# Altium footprint library huan_basic.PcbLib: 138 footprints (part 1 of 9)
Each footprint in its own frame and in the unit in brackets; x right, y up, seen from the top. Pads: shape width x height; smd on the part's side, far side on the other; paste and mask are expansions set on the pad; w line width, h text height; cw(c..) or ccw(c..) is an arc to the next point about the centre after c.
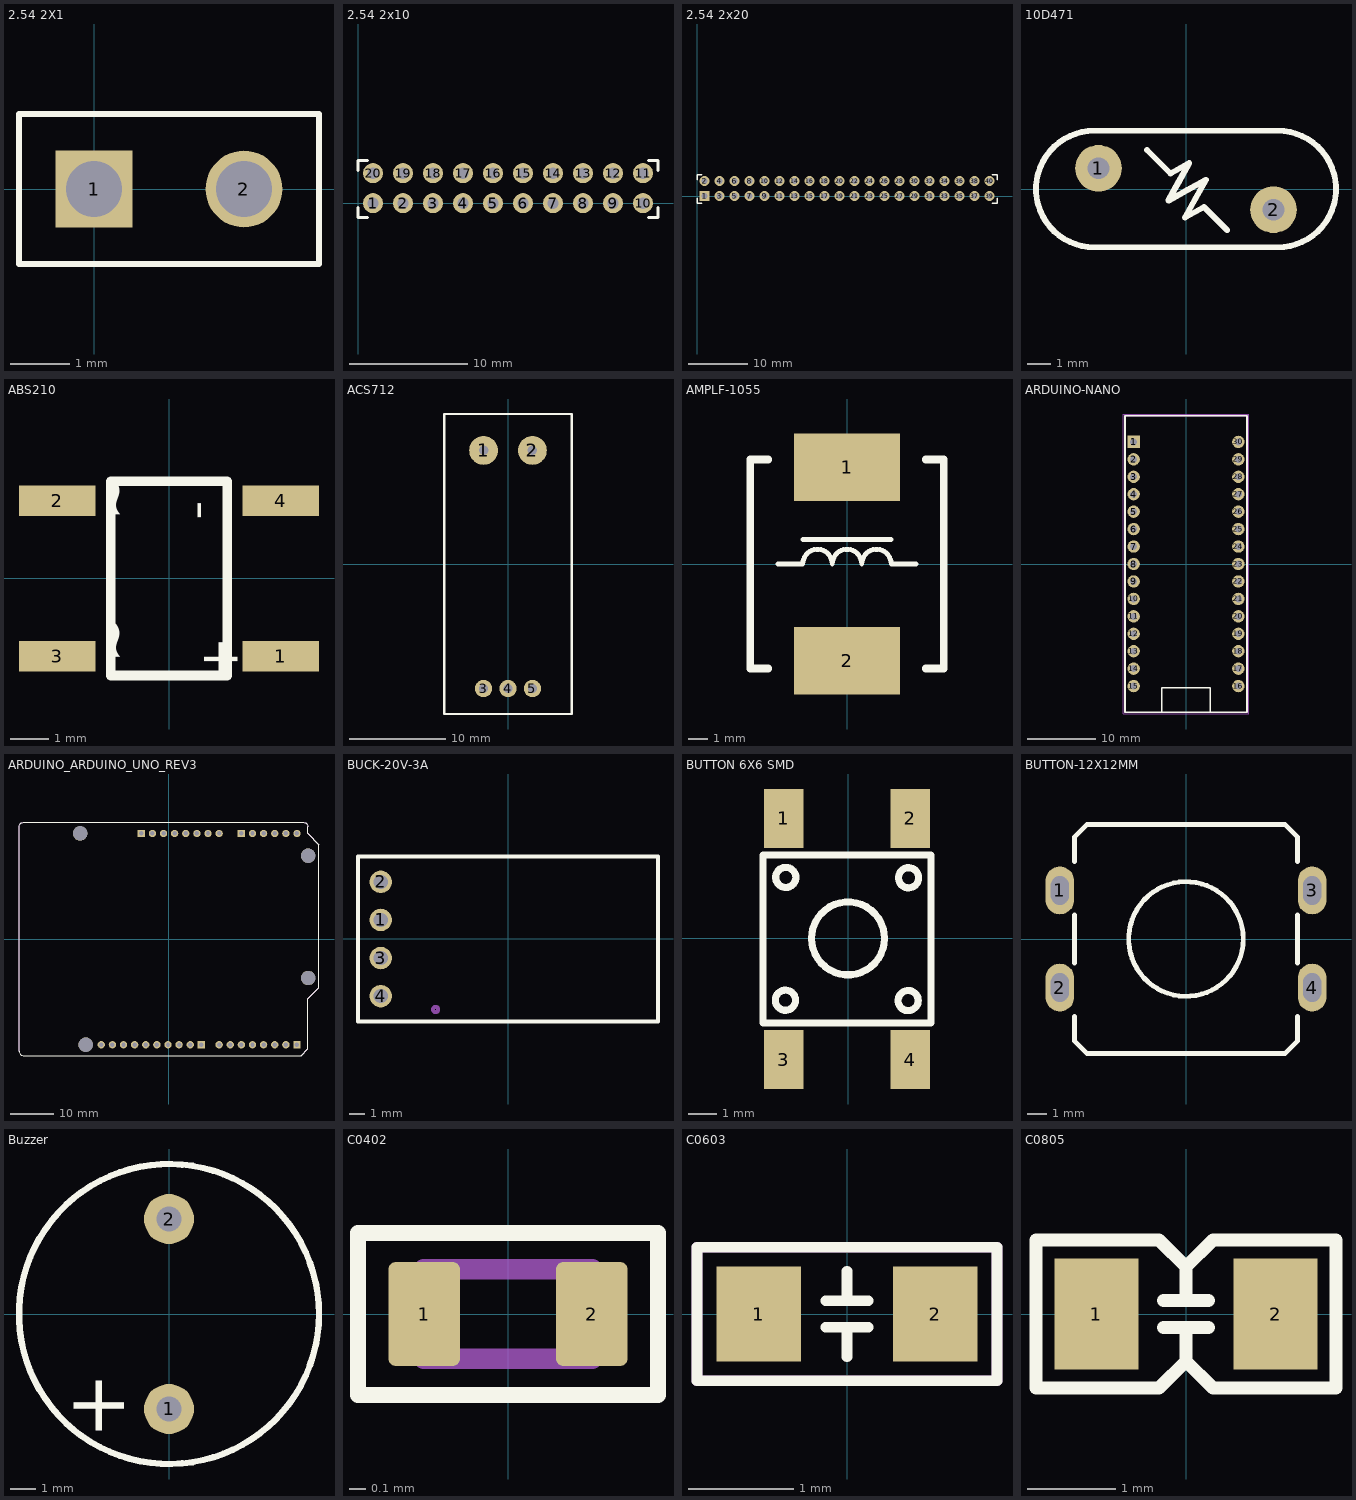
[diagram p0: the footprints below, top view; thin cyan lines are the x and y axes]

## 2.54 2X1 [mm]
pads (2):
  rect 1.3x1.3 hole 0.94: 1(0,0)
  round 1.3 hole 0.94: 2(2.54,0)
Top Overlay:
  lines w0.1: -1.27,-1.27 -1.27,1.27 3.81,1.27 3.81,-1.27 -1.27,-1.27
3D body "Jumper-red.step": height 8.5, standoff 2.5, extent -1.33,-1.2 3.87,1.2
3D body "100mill Male Pin Header_2P_R.STEP": height 8.4, standoff -2.8, extent -1.27,-1.23 3.81,1.27

## 2.54 2x10 [mm]
pads (20):
  round 1.7 hole 0.97: 1(1.27,0) 2(3.81,0) 3(6.35,0) 4(8.89,0) 5(11.43,0) 6(13.97,0) 7(16.51,0) 8(19.05,0) 9(21.59,0) 10(24.13,0) 11(24.13,2.54) 12(21.59,2.54) 13(19.05,2.54) 14(16.51,2.54) 15(13.97,2.54) 16(11.43,2.54) 17(8.89,2.54) 18(6.35,2.54) 19(3.81,2.54) 20(1.27,2.54)
Top Overlay:
  lines w0.254: 0,-0.381 0,-1.2 0.819,-1.2 ; 0,2.781 0,3.6 0.819,3.6 ; 24.581,-1.2 25.4,-1.2 25.4,-0.381 ; 24.581,3.6 25.4,3.6 25.4,2.781
3D body "10x_Male_Pin_2.54_mm.STEP": height 8.56, standoff -2.54, extent 0,-1.2 25.4,1.2
3D body "10x_Male_Pin_2.54_mm.STEP": height 8.56, standoff -2.54, extent 0,1.2 25.4,3.6

## 2.54 2x20 [mm]
pads (40):
  rect 1.7x1.7 hole 0.97: 1(1.27,0)
  round 1.7 hole 0.97: 2(1.27,2.54) 3(3.81,0) 4(3.81,2.54) 5(6.35,0) 6(6.35,2.54) 7(8.89,0) 8(8.89,2.54) 9(11.43,0) 10(11.43,2.54) 11(13.97,0) 12(13.97,2.54) 13(16.51,0) 14(16.51,2.54) 15(19.05,0) 16(19.05,2.54) 17(21.59,0) 18(21.59,2.54) 19(24.13,0) 20(24.13,2.54) 21(26.67,0) 22(26.67,2.54) 23(29.21,0) 24(29.21,2.54) 25(31.75,0) 26(31.75,2.54) 27(34.29,0) 28(34.29,2.54) 29(36.83,0) 30(36.83,2.54) 31(39.37,0) 32(39.37,2.54) 33(41.91,0) 34(41.91,2.54) 35(44.45,0) 36(44.45,2.54) 37(46.99,0) 38(46.99,2.54) 39(49.53,0) 40(49.53,2.54)
Top Overlay:
  lines w0.254: 0,-0.381 0,-1.2 0.819,-1.2 ; 0,2.781 0,3.6 0.819,3.6 ; 49.981,-1.2 50.8,-1.2 50.8,-0.381 ; 49.981,3.6 50.8,3.6 50.8,2.781
3D body "10x_Male_Pin_2.54_mm.STEP": height 8.56, standoff -2.54, extent 25.4,-1.2 50.8,1.2
3D body "10x_Male_Pin_2.54_mm.STEP": height 8.56, standoff -2.54, extent 25.4,1.2 50.8,3.6
3D body "10x_Male_Pin_2.54_mm.STEP": height 8.56, standoff -2.54, extent 0,-1.2 25.4,1.2
3D body "10x_Male_Pin_2.54_mm.STEP": height 8.56, standoff -2.54, extent 0,1.2 25.4,3.6

## 10D471 [mm]
pads (2):
  round 2 hole 0.94: 1(-3.755,0.889) 2(3.755,-0.889)
Top Overlay:
  lines w0.254: 1.771,-1.771 0.769,-0.769 -0.039,-1.218 0.41,-0.41 0.859,0.399 0.05,-0.05 -0.758,-0.499 -0.309,0.309 0.14,1.117 -0.668,0.668 ; -0.668,0.668 -1.671,1.671 -0.668,0.668 ; -3.937,-2.5 cw(c-3.937,0) -3.937,2.5 3.937,2.5 cw(c3.937,0) 3.937,-2.5 -3.937,-2.5
3D body "B72210a1.8th5.stp": height 14.6, standoff -2.5, extent -6,-2.5 6,2.5

## ABS210 [mm]
pads (4):
  rect 2x0.8 smd: 1(2.921,-2.032) 2(-2.921,2.032) 3(-2.921,-2.032) 4(2.921,2.032)
Top Overlay:
  lines w0.254: -1.524,-2.54 1.524,-2.54 1.524,2.54 -1.524,2.54 -1.524,-2.54
  text "+" at 0.58,-1.524 h1.75
  text "-" at 0.097,2.032 h1.75
  text "~" at -0.604,-2.205 h1.75
  text "~" at -0.604,1.519 h1.75
3D body "ABS210TR--3DModel-STEP-510211.STEP": height 1.7, standoff 0, extent -3.2,-2.525 3.2,2.525

## ACS712 [mm]
pads (5):
  round 3 hole 1: 1(-2.54,11.811) 2(2.54,11.811)
  round 1.8 hole 0.94: 3(-2.54,-12.954) 4(0,-12.954) 5(2.54,-12.954)
Top Overlay:
  lines w0.254: -6.65,-15.6 -6.65,15.6 6.65,15.6 6.65,-15.6 -6.65,-15.6
3D body "acs712.STEP": height 13.51, standoff -1.4, extent -6.65,-15.6 6.65,15.6

## AMPLF-1055 [mm]
pads (2):
  rect 5.5x3.5 smd: 1(0,5) 2(0,-5)
Top Overlay:
  lines w0.254: -3.556,0 -2.286,0 cw(c-1.524,0) -0.762,0 cw(c0,0) 0.762,0 cw(c1.524,0) 2.286,0 3.556,0 ; -2.286,1.27 2.286,1.27
  lines w0.4: -4.064,-5.4 -5,-5.4 -5,5.4 -4.064,5.4 ; 4.064,-5.4 5,-5.4 5,5.4 4.064,5.4
3D body "Inductor_SMD_AMPLF_1055.STEP": height 5.31, standoff -0.2, extent -5,-5.4 5,5.4

## ARDUINO-NANO [mm]
pads (30):
  rect 1.8x1.8 hole 1: 1(-7.62,17.78)
  round 1.8 hole 1: 2(-7.62,15.24) 3(-7.62,12.7) 4(-7.62,10.16) 5(-7.62,7.62) 6(-7.62,5.08) 7(-7.62,2.54) 8(-7.62,0) 9(-7.62,-2.54) 10(-7.62,-5.08) 11(-7.62,-7.62) 12(-7.62,-10.16) 13(-7.62,-12.7) 14(-7.62,-15.24) 15(-7.62,-17.78) 16(7.62,-17.78) 17(7.62,-15.24) 18(7.62,-12.7) 19(7.62,-10.16) 20(7.62,-7.62) 21(7.62,-5.08) 22(7.62,-2.54) 23(7.62,0) 24(7.62,2.54) 25(7.62,5.08) 26(7.62,7.62) 27(7.62,10.16) 28(7.62,12.7) 29(7.62,15.24) 30(7.62,17.78)
Top Overlay:
  lines w0.254: -3.513,-21.59 -3.513,-18.034 0,-18.034 3.513,-18.034 3.513,-21.59 ; -8.89,-21.59 8.89,-21.59 8.89,21.59 -8.89,21.59 -8.89,-21.59
Mechanical 1:
  lines w0.127: -8.89,-21.59 -8.89,21.59 8.89,21.59 8.89,-21.59 -8.89,-21.59
Mechanical 15:
  lines w0.05: -9.14,-21.84 9.14,-21.84 9.14,21.84 -9.14,21.84 -9.14,-21.84
3D body "Arduino_NANO_CH340.step": height 9, standoff -5.14, extent -8.89,-22.48 8.89,21.71

## ARDUINO_ARDUINO_UNO_REV3 [mil]
pads (36):
  round 66 hole 40: 3V3(50.9,949.18) 5V(150.9,949.18) A1(750.9,949.18) A2(850.9,949.18) A3(950.9,949.18) A4(1050.9,949.18) A4_SDA(-509.11,-950.82) A5(1150.9,949.18) A5_SCL(-609.11,-950.82) AREF(-409.11,-950.82) D1(1050.89,-950.82) D2(950.89,-950.82) D3(850.89,-950.82) D4(750.89,-950.82) D5(650.89,-950.82) D6(550.89,-950.82) D7(450.89,-950.82) D9(190.89,-950.82) D10(90.89,-950.82) D11(-9.11,-950.82) D12(-109.11,-950.82) D13(-209.11,-950.82) GND_1(350.9,949.18) GND_2(250.9,949.18) GND_3(-309.11,-950.82) IOREF(-149.1,949.18) RST(-49.1,949.18) VIN(450.9,949.18)
  rect 66x66 hole 40: A0(650.9,949.18) D0(1150.89,-950.82) D8(290.89,-950.82) P1(-249.1,949.18)
  round 129.92 hole 129.92 unplated: ""(-799.1,949.18) ""(-749.11,-950.82) ""(1250.89,-350.82) ""(1250.9,749.18)
Top Overlay:
  lines w5: -1349.11,-1009.2 -1349.11,1010.09 -1347.44,1020.08 -1344.1,1029.24 -1337.44,1037.58 -1329.11,1044.24 -1319.95,1047.57 -1309.95,1049.24 1209.99,1049.24 1219.99,1047.57 1229.15,1044.24 1237.48,1037.58 1244.15,1029.24 1247.48,1020.08 1249.14,1010.08 1249.14,949.27 1349.11,849.31 1349.11,-439.4 1249.14,-539.37 1249.14,-989.21 1189.16,-1049.19 -1309.95,-1049.18 -1319.95,-1047.52 -1329.11,-1043.35 -1337.44,-1037.52 -1344.11,-1029.19 -1347.44,-1020.03 -1349.11,-1009.2
Mechanical 13:
  lines w5: -1349.11,-1010.09 -1349.11,1009.2 -1347.44,1020.03 -1344.11,1029.19 -1337.44,1037.52 -1329.11,1043.35 -1319.95,1047.52 -1309.95,1049.18 1189.16,1049.18 ; -1349.1,1010.08 -1347.44,1020.08 -1344.1,1029.24 -1337.44,1037.58 -1329.11,1044.24 -1319.95,1047.57 -1309.95,1049.24 1209.99,1049.24 1219.99,1047.57 1229.15,1044.24 1237.48,1037.58 1244.15,1029.24 1247.48,1020.08 1249.14,1010.08 1249.14,949.27 1349.11,849.31 1349.11,-439.4 1249.14,-539.37 1249.14,-989.21 1189.16,-1049.19
3D body "A000066.STEP": height -5.11, standoff -590.16, extent -1605.52,-1050 1350,1050

## BUCK-20V-3A [mm]
pads (4):
  round 1.5 hole 0.94: 1(-8.484,1.27) 2(-8.484,3.81) 3(-8.484,-1.27) 4(-8.484,-3.81)
Top Overlay:
  lines w0.254: -10,-5.5 -10,5.5 10,5.5 10,-5.5 -10,-5.5
Mechanical 15:
  circle w0.254: c-4.826,-4.699 r0.18
3D body "Buck Converter Model.STEP": height 6.6, standoff -5.8, extent -10,-5.5 10,5.5

## BUTTON 6X6 SMD [mm]
pads (4):
  rect 1.4x2.1 smd: 1(-2.286,4.274) 2(2.214,4.274) 3(-2.286,-4.318) 4(2.214,-4.318)
Top Overlay:
  circle w0.254: c2.145,-2.217 r0.359
  circle w0.254: c-2.231,-2.203 r0.359
  circle w0.254: c-2.217,2.173 r0.359
  circle w0.254: c2.159,2.159 r0.359
  circle w0.254: c0,0 r1.3
  lines w0.254: -3.036,-3.022 2.964,-3.022 2.964,2.978 -3.036,2.978 -3.036,-3.022
3D body "button_smd_6x6x5.0.stp": height 5, standoff 0, extent -3,-4 3,4

## BUTTON-12X12MM [mm]
pads (4):
  oval 1.5x2.5 hole 0.94 slot 1.5 at 90 deg: 1(-6.604,2.54) 2(-6.604,-2.54) 3(6.604,2.54) 4(6.604,-2.54)
Top Overlay:
  circle w0.254: c0,0 r3
  lines w0.254: -5.842,-4.064 -5.842,-5.334 -5.176,-6 0,-6 5.176,-6 5.842,-5.334 5.842,-4.064 ; -5.842,-1.27 -5.842,1.27 ; -5.842,4.064 -5.842,5.334 -5.176,6 0,6 5.176,6 5.842,5.334 5.842,4.064 ; 5.842,-1.27 5.842,1.27
3D body "12mm switch.step": height 8, standoff -2.8, extent -6.974,-6 6.974,6

## Buzzer [mm]
pads (2):
  round 2 hole 1: 1(0,-3.8) 2(0,3.8)
Top Overlay:
  circle w0.254: c0,0 r6
  text "+" at -1.034,-5.004 h4
3D body "buzzer.stp": height 9.5, standoff -5.5, extent -6,-6 6,6

## C0402 [mm]
pads (2):
  rrect20% 0.45x0.65 smd: 1(-0.525,0) 2(0.525,0)
Top Overlay:
  lines w0.1: -0.94,-0.508 0.94,-0.508 0.94,0.508 0.889,0.508 -0.94,0.508 -0.94,-0.508
Mechanical 13:
  lines w0.127: -0.53,-0.28 -0.53,0.28 0.53,0.28 0.53,-0.28 -0.53,-0.28
3D body "C0402.STEP": height 0.5, standoff 0, extent -0.5,-0.25 0.5,0.25

## C0603 [mm]
pads (2):
  rect 0.8x0.9 smd: 1(-0.838,0) 2(0.838,0)
Top Overlay:
  lines w0.1: -0.203,-0.127 0,-0.127 ; -0.203,0.127 0,0.127 ; 0,-0.406 0,-0.127 ; 0,0.406 0,0.127 ; 0.203,-0.127 0,-0.127 ; 0.203,0.127 0,0.127 ; -1.422,-0.635 1.422,-0.635 1.422,0.635 -1.422,0.635 -1.422,-0.635
Mechanical 15:
  lines w0.1: 1.422,-0.635 1.422,0.635 ; 1.422,-0.635 -1.422,-0.635 -1.422,0.635 1.422,0.635 ; 1.422,-0.635 1.422,0.635
3D body "csmd-0603_l1-6_w0-81_h0-86.stp": height 0.86, standoff 0, extent -0.8,-0.405 0.8,0.405

## C0805 [mm]
pads (2):
  rect 0.95x1.26 smd: 1(-1.016,0) 2(1.016,0)
Top Overlay:
  lines w0.15: -0.254,-0.152 0,-0.152 ; -0.254,0.152 0,0.152 ; 0.254,-0.152 0,-0.152 ; 0.254,0.152 0,0.152 ; 0,-0.533 0,-0.152 ; 0,-0.533 -0.305,-0.838 -1.702,-0.838 -1.702,0.838 -0.305,0.838 0,0.533 ; 0,-0.533 0.305,-0.838 1.702,-0.838 1.702,0.838 0.305,0.838 0,0.533 ; 0,0.152 0,0.533
3D body "csmd-0805_l2-01_w1-25_h0-94.stp": height 0.94, standoff 0, extent -1.005,-0.625 1.005,0.625